# Altium footprint library ICs_VendorSpecific.PcbLib: 247 footprints (part 17 of 19)
Each footprint in its own frame and in the unit in brackets; x right, y up, seen from the top. Pads: shape width x height; smd on the part's side, far side on the other; paste and mask are expansions set on the pad; w line width, h text height; cw(c..) or ccw(c..) is an arc to the next point about the centre after c.
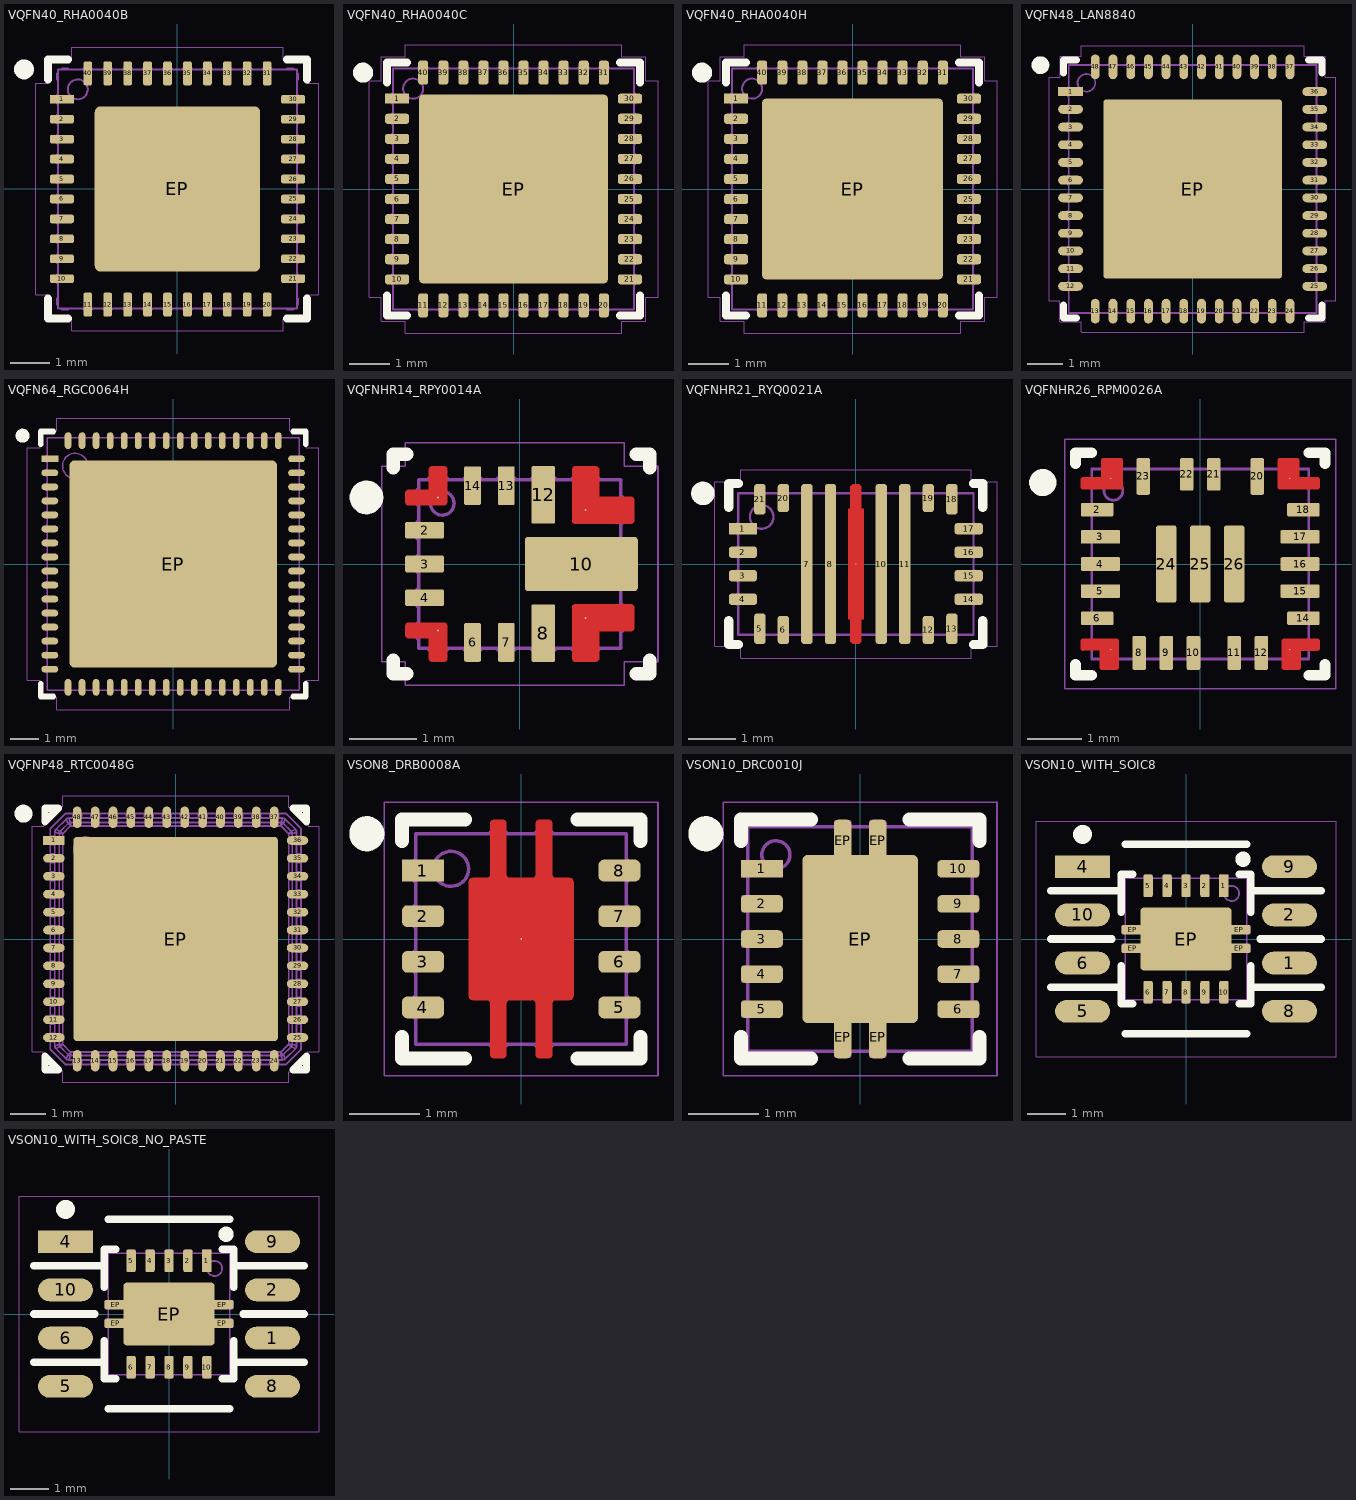
[diagram p16: the footprints below, top view; thin cyan lines are the x and y axes]

## VQFN40_RHA0040B [mm] "QFN, 40-Leads, Body 6x6mm, Pitch 0.50mm, Thermal Pad 4.150x4.15mm.  TI case RHA0040B"
height 1
pads (41):
  rect 0.6x0.22 smd paste+0 mask+0.05: 1(-2.9,2.25)
  rrect45% 0.6x0.22 smd paste+0 mask+0.05: 2(-2.9,1.75) 3(-2.9,1.25) 4(-2.9,0.75) 5(-2.9,0.25) 6(-2.9,-0.25) 7(-2.9,-0.75) 8(-2.9,-1.25) 9(-2.9,-1.75) 10(-2.9,-2.25) 21(2.9,-2.25) 22(2.9,-1.75) 23(2.9,-1.25) 24(2.9,-0.75) 25(2.9,-0.25) 26(2.9,0.25) 27(2.9,0.75) 28(2.9,1.25) 29(2.9,1.75) 30(2.9,2.25)
  rrect45% 0.22x0.6 smd paste+0 mask+0.05: 11(-2.25,-2.9) 12(-1.75,-2.9) 13(-1.25,-2.9) 14(-0.75,-2.9) 15(-0.25,-2.9) 16(0.25,-2.9) 17(0.75,-2.9) 18(1.25,-2.9) 19(1.75,-2.9) 20(2.25,-2.9) 31(2.25,2.9) 32(1.75,2.9) 33(1.25,2.9) 34(0.75,2.9) 35(0.25,2.9) 36(-0.25,2.9) 37(-0.75,2.9) 38(-1.25,2.9) 39(-1.75,2.9) 40(-2.25,2.9)
  rrect7% 4.15x4.15 smd paste-10 mask+0.05: EP(0,0)
Top Overlay:
  circle w0.25: c-3.85,3 r0.125
  lines w0.2: -3.25,-2.75 -3.25,-3.25 -2.75,-3.25 ; -3.25,2.75 -3.25,3.25 -2.75,3.25 ; 2.75,-3.25 3.25,-3.25 3.25,-2.75 ; 2.75,3.25 3.25,3.25 3.25,2.75
Top Paste:
  drawing of 9 lines, arcs and shapes, not listed
Top Courtyard:
  lines w0.025: -3.55,-2.65 -3.25,-2.65 -3.25,-3.25 -2.65,-3.25 -2.65,-3.55 2.65,-3.55 2.65,-3.25 3.25,-3.25 3.25,-2.65 3.55,-2.65 3.55,2.65 3.25,2.65 3.25,3.25 2.65,3.25 2.65,3.55 -2.65,3.55 -2.65,3.25 -3.25,3.25 -3.25,2.65 -3.55,2.65 -3.55,-2.65
Top Assembly:
  circle w0.05: c-2.5,2.5 r0.25
  lines w0.05: -3,-2.9 -3.025,-2.9 -3.025,-2.75 -3,-2.75 ; -3,-2.36 -3.025,-2.36 -3.025,-2.14 -3,-2.14 ; -3,-1.86 -3.025,-1.86 -3.025,-1.64 -3,-1.64 ; -3,-1.36 -3.025,-1.36 -3.025,-1.14 -3,-1.14 ; -3,-0.86 -3.025,-0.86 -3.025,-0.64 -3,-0.64 ; -3,-0.36 -3.025,-0.36 -3.025,-0.14 -3,-0.14 ; -3,0.14 -3.025,0.14 -3.025,0.36 -3,0.36 ; -3,0.64 -3.025,0.64 -3.025,0.86 -3,0.86 ; -3,1.14 -3.025,1.14 -3.025,1.36 -3,1.36 ; -3,1.64 -3.025,1.64 -3.025,1.86 -3,1.86 ; -3,2.14 -3.025,2.14 -3.025,2.36 -3,2.36 ; -3,2.75 -3.025,2.75 -3.025,2.9 -3,2.9 ; -2.9,-3 -2.9,-3.025 -2.75,-3.025 -2.75,-3 ; -2.9,3 -2.9,3.025 -2.75,3.025 -2.75,3 ; -2.36,-3 -2.36,-3.025 -2.14,-3.025 -2.14,-3 ; -2.36,3 -2.36,3.025 -2.14,3.025 -2.14,3 ; -1.86,-3 -1.86,-3.025 -1.64,-3.025 -1.64,-3 ; -1.86,3 -1.86,3.025 -1.64,3.025 -1.64,3 ; -1.36,-3 -1.36,-3.025 -1.14,-3.025 -1.14,-3 ; -1.36,3 -1.36,3.025 -1.14,3.025 -1.14,3 ; -0.86,-3 -0.86,-3.025 -0.64,-3.025 -0.64,-3 ; -0.86,3 -0.86,3.025 -0.64,3.025 -0.64,3 ; -0.36,-3 -0.36,-3.025 -0.14,-3.025 -0.14,-3 ; -0.36,3 -0.36,3.025 -0.14,3.025 -0.14,3 ; 0.14,-3 0.14,-3.025 0.36,-3.025 0.36,-3 ; 0.14,3 0.14,3.025 0.36,3.025 0.36,3 ; 0.64,-3 0.64,-3.025 0.86,-3.025 0.86,-3 ; 0.64,3 0.64,3.025 0.86,3.025 0.86,3 ; 1.14,-3 1.14,-3.025 1.36,-3.025 1.36,-3 ; 1.14,3 1.14,3.025 1.36,3.025 1.36,3 ; 1.64,-3 1.64,-3.025 1.86,-3.025 1.86,-3 ; 1.64,3 1.64,3.025 1.86,3.025 1.86,3 ; 2.14,-3 2.14,-3.025 2.36,-3.025 2.36,-3 ; 2.14,3 2.14,3.025 2.36,3.025 2.36,3 ; 2.75,-3 2.75,-3.025 2.9,-3.025 2.9,-3 ; 2.75,3 2.75,3.025 2.9,3.025 2.9,3 ; 3,-2.9 3.025,-2.9 3.025,-2.75 3,-2.75 ; 3,-2.36 3.025,-2.36 3.025,-2.14 3,-2.14 ; 3,-1.86 3.025,-1.86 3.025,-1.64 3,-1.64 ; 3,-1.36 3.025,-1.36 3.025,-1.14 3,-1.14 ; 3,-0.86 3.025,-0.86 3.025,-0.64 3,-0.64 ; 3,-0.36 3.025,-0.36 3.025,-0.14 3,-0.14 ; 3,0.14 3.025,0.14 3.025,0.36 3,0.36 ; 3,0.64 3.025,0.64 3.025,0.86 3,0.86 ; 3,1.14 3.025,1.14 3.025,1.36 3,1.36 ; 3,1.64 3.025,1.64 3.025,1.86 3,1.86 ; 3,2.14 3.025,2.14 3.025,2.36 3,2.36 ; 3,2.75 3.025,2.75 3.025,2.9 3,2.9 ; -3,-3 3,-3 3,3 -3,3 -3,-3
  text ".Designator" at -4.511,-0.453 h2
3D body "VQFN40_RHA0040B.x_t": height 1.02, standoff -0.01, extent -3.025,-3.025 3.025,3.025

## VQFN40_RHA0040C [mm] "VQFN 6mm x 6mm, TI case RHA0040C"
height 1
pads (41):
  rect 0.6x0.25 smd paste+0 mask+0.05: 1(-2.9,2.25)
  rrect50% 0.6x0.25 smd paste+0 mask+0.05: 2(-2.9,1.75) 3(-2.9,1.25) 4(-2.9,0.75) 5(-2.9,0.25) 6(-2.9,-0.25) 7(-2.9,-0.75) 8(-2.9,-1.25) 9(-2.9,-1.75) 10(-2.9,-2.25) 21(2.9,-2.25) 22(2.9,-1.75) 23(2.9,-1.25) 24(2.9,-0.75) 25(2.9,-0.25) 26(2.9,0.25) 27(2.9,0.75) 28(2.9,1.25) 29(2.9,1.75) 30(2.9,2.25)
  rrect50% 0.25x0.6 smd paste+0 mask+0.05: 11(-2.25,-2.9) 12(-1.75,-2.9) 13(-1.25,-2.9) 14(-0.75,-2.9) 15(-0.25,-2.9) 16(0.25,-2.9) 17(0.75,-2.9) 18(1.25,-2.9) 19(1.75,-2.9) 20(2.25,-2.9) 31(2.25,2.9) 32(1.75,2.9) 33(1.25,2.9) 34(0.75,2.9) 35(0.25,2.9) 36(-0.25,2.9) 37(-0.75,2.9) 38(-1.25,2.9) 39(-1.75,2.9) 40(-2.25,2.9)
  rrect4% 4.7x4.7 smd paste-10 mask+0.05: EP(0,0)
Top Overlay:
  circle w0.25: c-3.75,2.9 r0.125
  lines w0.2: -3.15,-2.65 -3.15,-3.15 -2.65,-3.15 ; -3.15,2.65 -3.15,3.15 -2.65,3.15 ; 2.65,-3.15 3.15,-3.15 3.15,-2.65 ; 2.65,3.15 3.15,3.15 3.15,2.65
Top Paste:
  rectangle: 0.9,-0.6 2.1,0.6
  rectangle: -0.6,-0.6 0.6,0.6
  rectangle: -2.1,-0.6 -0.9,0.6
  rectangle: -2.1,0.9 -0.9,2.1
  rectangle: -0.6,0.9 0.6,2.1
  rectangle: 0.9,0.9 2.1,2.1
  rectangle: 0.9,-2.1 2.1,-0.9
  rectangle: -0.6,-2.1 0.6,-0.9
  rectangle: -2.1,-2.1 -0.9,-0.9
Top Courtyard:
  lines w0.025: -3.6,-2.7 -3.6,2.7 -3.3,2.7 -3.3,3.3 -2.7,3.3 -2.7,3.6 2.7,3.6 2.7,3.3 3.3,3.3 3.3,2.7 3.6,2.7 3.6,-2.7 3.3,-2.7 3.3,-3.3 2.7,-3.3 2.7,-3.6 -2.7,-3.6 -2.7,-3.3 -3.3,-3.3 -3.3,-2.7 -3.6,-2.7
Top Assembly:
  circle w0.05: c-2.5,2.5 r0.25
  lines w0.05: -3,-2.375 -3.025,-2.375 -3.025,-2.125 -3,-2.125 ; -3,-1.875 -3.025,-1.875 -3.025,-1.625 -3,-1.625 ; -3,-1.375 -3.025,-1.375 -3.025,-1.125 -3,-1.125 ; -3,-0.875 -3.025,-0.875 -3.025,-0.625 -3,-0.625 ; -3,-0.375 -3.025,-0.375 -3.025,-0.125 -3,-0.125 ; -3,0.125 -3.025,0.125 -3.025,0.375 -3,0.375 ; -3,0.625 -3.025,0.625 -3.025,0.875 -3,0.875 ; -3,1.125 -3.025,1.125 -3.025,1.375 -3,1.375 ; -3,1.625 -3.025,1.625 -3.025,1.875 -3,1.875 ; -3,2.125 -3.025,2.125 -3.025,2.375 -3,2.375 ; -2.375,-3 -2.375,-3.025 -2.125,-3.025 -2.125,-3 ; -2.375,3 -2.375,3.025 -2.125,3.025 -2.125,3 ; -1.875,-3 -1.875,-3.025 -1.625,-3.025 -1.625,-3 ; -1.875,3 -1.875,3.025 -1.625,3.025 -1.625,3 ; -1.375,-3 -1.375,-3.025 -1.125,-3.025 -1.125,-3 ; -1.375,3 -1.375,3.025 -1.125,3.025 -1.125,3 ; -0.875,-3 -0.875,-3.025 -0.625,-3.025 -0.625,-3 ; -0.875,3 -0.875,3.025 -0.625,3.025 -0.625,3 ; -0.375,-3 -0.375,-3.025 -0.125,-3.025 -0.125,-3 ; -0.375,3 -0.375,3.025 -0.125,3.025 -0.125,3 ; 0.125,-3 0.125,-3.025 0.375,-3.025 0.375,-3 ; 0.125,3 0.125,3.025 0.375,3.025 0.375,3 ; 0.625,-3 0.625,-3.025 0.875,-3.025 0.875,-3 ; 0.625,3 0.625,3.025 0.875,3.025 0.875,3 ; 1.125,-3 1.125,-3.025 1.375,-3.025 1.375,-3 ; 1.125,3 1.125,3.025 1.375,3.025 1.375,3 ; 1.625,-3 1.625,-3.025 1.875,-3.025 1.875,-3 ; 1.625,3 1.625,3.025 1.875,3.025 1.875,3 ; 2.125,-3 2.125,-3.025 2.375,-3.025 2.375,-3 ; 2.125,3 2.125,3.025 2.375,3.025 2.375,3 ; 3,-2.375 3.025,-2.375 3.025,-2.125 3,-2.125 ; 3,-1.875 3.025,-1.875 3.025,-1.625 3,-1.625 ; 3,-1.375 3.025,-1.375 3.025,-1.125 3,-1.125 ; 3,-0.875 3.025,-0.875 3.025,-0.625 3,-0.625 ; 3,-0.375 3.025,-0.375 3.025,-0.125 3,-0.125 ; 3,0.125 3.025,0.125 3.025,0.375 3,0.375 ; 3,0.625 3.025,0.625 3.025,0.875 3,0.875 ; 3,1.125 3.025,1.125 3.025,1.375 3,1.375 ; 3,1.625 3.025,1.625 3.025,1.875 3,1.875 ; 3,2.125 3.025,2.125 3.025,2.375 3,2.375 ; -3,-3 3,-3 3,3 -3,3 -3,-3
  text ".Designator" at -4.511,-0.453 h2
3D body "VQFN40_RHA0040C.x_t": height 1.03, standoff 0, extent -3.025,-3.025 3.025,3.025

## VQFN40_RHA0040H [mm] "VQFN 6mm x 6mm, TI case RHA0040H"
height 1
pads (41):
  rect 0.6x0.25 smd paste+0 mask+0.05: 1(-2.9,2.25)
  rrect50% 0.6x0.25 smd paste+0 mask+0.05: 2(-2.9,1.75) 3(-2.9,1.25) 4(-2.9,0.75) 5(-2.9,0.25) 6(-2.9,-0.25) 7(-2.9,-0.75) 8(-2.9,-1.25) 9(-2.9,-1.75) 10(-2.9,-2.25) 21(2.9,-2.25) 22(2.9,-1.75) 23(2.9,-1.25) 24(2.9,-0.75) 25(2.9,-0.25) 26(2.9,0.25) 27(2.9,0.75) 28(2.9,1.25) 29(2.9,1.75) 30(2.9,2.25)
  rrect50% 0.25x0.6 smd paste+0 mask+0.05: 11(-2.25,-2.9) 12(-1.75,-2.9) 13(-1.25,-2.9) 14(-0.75,-2.9) 15(-0.25,-2.9) 16(0.25,-2.9) 17(0.75,-2.9) 18(1.25,-2.9) 19(1.75,-2.9) 20(2.25,-2.9) 31(2.25,2.9) 32(1.75,2.9) 33(1.25,2.9) 34(0.75,2.9) 35(0.25,2.9) 36(-0.25,2.9) 37(-0.75,2.9) 38(-1.25,2.9) 39(-1.75,2.9) 40(-2.25,2.9)
  rrect4% 4.5x4.5 smd paste-10 mask+0.05: EP(0,0)
Top Overlay:
  circle w0.25: c-3.75,2.9 r0.125
  lines w0.2: -3.15,-2.65 -3.15,-3.15 -2.65,-3.15 ; -3.15,2.65 -3.15,3.15 -2.65,3.15 ; 2.65,-3.15 3.15,-3.15 3.15,-2.65 ; 2.65,3.15 3.15,3.15 3.15,2.65
Top Paste:
  rectangle: -2.1,-2.1 -0.9,-0.9
  rectangle: -0.6,-2.1 0.6,-0.9
  rectangle: 0.9,-2.1 2.1,-0.9
  rectangle: 0.9,0.9 2.1,2.1
  rectangle: -0.6,0.9 0.6,2.1
  rectangle: -2.1,0.9 -0.9,2.1
  rectangle: -2.1,-0.6 -0.9,0.6
  rectangle: -0.6,-0.6 0.6,0.6
  rectangle: 0.9,-0.6 2.1,0.6
Top Courtyard:
  lines w0.025: -3.6,-2.7 -3.6,2.7 -3.3,2.7 -3.3,3.3 -2.7,3.3 -2.7,3.6 2.7,3.6 2.7,3.3 3.3,3.3 3.3,2.7 3.6,2.7 3.6,-2.7 3.3,-2.7 3.3,-3.3 2.7,-3.3 2.7,-3.6 -2.7,-3.6 -2.7,-3.3 -3.3,-3.3 -3.3,-2.7 -3.6,-2.7
Top Assembly:
  circle w0.05: c-2.5,2.5 r0.25
  lines w0.05: -3,-2.375 -3.025,-2.375 -3.025,-2.125 -3,-2.125 ; -3,-1.875 -3.025,-1.875 -3.025,-1.625 -3,-1.625 ; -3,-1.375 -3.025,-1.375 -3.025,-1.125 -3,-1.125 ; -3,-0.875 -3.025,-0.875 -3.025,-0.625 -3,-0.625 ; -3,-0.375 -3.025,-0.375 -3.025,-0.125 -3,-0.125 ; -3,0.125 -3.025,0.125 -3.025,0.375 -3,0.375 ; -3,0.625 -3.025,0.625 -3.025,0.875 -3,0.875 ; -3,1.125 -3.025,1.125 -3.025,1.375 -3,1.375 ; -3,1.625 -3.025,1.625 -3.025,1.875 -3,1.875 ; -3,2.125 -3.025,2.125 -3.025,2.375 -3,2.375 ; -2.375,-3 -2.375,-3.025 -2.125,-3.025 -2.125,-3 ; -2.375,3 -2.375,3.025 -2.125,3.025 -2.125,3 ; -1.875,-3 -1.875,-3.025 -1.625,-3.025 -1.625,-3 ; -1.875,3 -1.875,3.025 -1.625,3.025 -1.625,3 ; -1.375,-3 -1.375,-3.025 -1.125,-3.025 -1.125,-3 ; -1.375,3 -1.375,3.025 -1.125,3.025 -1.125,3 ; -0.875,-3 -0.875,-3.025 -0.625,-3.025 -0.625,-3 ; -0.875,3 -0.875,3.025 -0.625,3.025 -0.625,3 ; -0.375,-3 -0.375,-3.025 -0.125,-3.025 -0.125,-3 ; -0.375,3 -0.375,3.025 -0.125,3.025 -0.125,3 ; 0.125,-3 0.125,-3.025 0.375,-3.025 0.375,-3 ; 0.125,3 0.125,3.025 0.375,3.025 0.375,3 ; 0.625,-3 0.625,-3.025 0.875,-3.025 0.875,-3 ; 0.625,3 0.625,3.025 0.875,3.025 0.875,3 ; 1.125,-3 1.125,-3.025 1.375,-3.025 1.375,-3 ; 1.125,3 1.125,3.025 1.375,3.025 1.375,3 ; 1.625,-3 1.625,-3.025 1.875,-3.025 1.875,-3 ; 1.625,3 1.625,3.025 1.875,3.025 1.875,3 ; 2.125,-3 2.125,-3.025 2.375,-3.025 2.375,-3 ; 2.125,3 2.125,3.025 2.375,3.025 2.375,3 ; 3,-2.375 3.025,-2.375 3.025,-2.125 3,-2.125 ; 3,-1.875 3.025,-1.875 3.025,-1.625 3,-1.625 ; 3,-1.375 3.025,-1.375 3.025,-1.125 3,-1.125 ; 3,-0.875 3.025,-0.875 3.025,-0.625 3,-0.625 ; 3,-0.375 3.025,-0.375 3.025,-0.125 3,-0.125 ; 3,0.125 3.025,0.125 3.025,0.375 3,0.375 ; 3,0.625 3.025,0.625 3.025,0.875 3,0.875 ; 3,1.125 3.025,1.125 3.025,1.375 3,1.375 ; 3,1.625 3.025,1.625 3.025,1.875 3,1.875 ; 3,2.125 3.025,2.125 3.025,2.375 3,2.375 ; -3,-3 3,-3 3,3 -3,3 -3,-3
  text ".Designator" at -4.511,-0.453 h2
3D body "VQFN40_RHA0040H.x_t": height 1.03, standoff 0, extent -3.025,-3.025 3.025,3.025

## VQFN48_LAN8840 [mm] "VQFN, 48-Leads, Body 7x7mm, Pitch 0.50mm, Thermal Pad 5.05x5.05mm."
height 0.9
pads (49):
  rect 0.7x0.25 smd paste+0 mask+0.05: 1(-3.45,2.75)
  oval 0.7x0.25 smd paste+0 mask+0.05: 2(-3.45,2.25) 3(-3.45,1.75) 4(-3.45,1.25) 5(-3.45,0.75) 6(-3.45,0.25) 7(-3.45,-0.25) 8(-3.45,-0.75) 9(-3.45,-1.25) 10(-3.45,-1.75) 11(-3.45,-2.25) 12(-3.45,-2.75) 25(3.45,-2.75) 26(3.45,-2.25) 27(3.45,-1.75) 28(3.45,-1.25) 29(3.45,-0.75) 30(3.45,-0.25) 31(3.45,0.25) 32(3.45,0.75) 33(3.45,1.25) 34(3.45,1.75) 35(3.45,2.25) 36(3.45,2.75)
  oval 0.25x0.7 smd paste+0 mask+0.05: 13(-2.75,-3.45) 14(-2.25,-3.45) 15(-1.75,-3.45) 16(-1.25,-3.45) 17(-0.75,-3.45) 18(-0.25,-3.45) 19(0.25,-3.45) 20(0.75,-3.45) 21(1.25,-3.45) 22(1.75,-3.45) 23(2.25,-3.45) 24(2.75,-3.45) 37(2.75,3.45) 38(2.25,3.45) 39(1.75,3.45) 40(1.25,3.45) 41(0.75,3.45) 42(0.25,3.45) 43(-0.25,3.45) 44(-0.75,3.45) 45(-1.25,3.45) 46(-1.75,3.45) 47(-2.25,3.45) 48(-2.75,3.45)
  rrect3% 5.05x5.05 smd paste-50 mask+0.05: EP(0,0)
Top Overlay:
  circle w0.25: c-4.3,3.5 r0.125
  lines w0.2: -3.65,-3.275 -3.65,-3.65 -3.275,-3.65 ; -3.65,3.275 -3.65,3.65 -3.275,3.65 ; 3.275,-3.65 3.65,-3.65 3.65,-3.275 ; 3.275,3.65 3.65,3.65 3.65,3.275
Top Paste:
  region: 1.15,-1.15 1.15,-0.15 0.15,-0.15 0.15,-1.15
  region: -1.45,-1.15 -1.45,-0.15 -2.45,-0.15 -2.45,-1.15
  region: -0.15,-1.15 -0.15,-0.15 -1.15,-0.15 -1.15,-1.15
  region: -1.45,1.45 -1.45,2.45 -2.45,2.45 -2.45,1.45
  region: -0.15,1.45 -0.15,2.45 -1.15,2.45 -1.15,1.45
  region: 1.15,1.45 1.15,2.45 0.15,2.45 0.15,1.45
  region: 1.15,0.15 1.15,1.15 0.15,1.15 0.15,0.15
  region: -1.45,0.15 -1.45,1.15 -2.45,1.15 -2.45,0.15
  region: -0.15,0.15 -0.15,1.15 -1.15,1.15 -1.15,0.15
  region: 1.15,-2.45 1.15,-1.45 0.15,-1.45 0.15,-2.45
  region: -1.45,-2.45 -1.45,-1.45 -2.45,-1.45 -2.45,-2.45
  region: -0.15,-2.45 -0.15,-1.45 -1.15,-1.45 -1.15,-2.45
  region: 2.45,-1.15 2.45,-0.15 1.45,-0.15 1.45,-1.15
  region: 2.45,1.45 2.45,2.45 1.45,2.45 1.45,1.45
  region: 2.45,0.15 2.45,1.15 1.45,1.15 1.45,0.15
  region: 2.45,-2.45 2.45,-1.45 1.45,-1.45 1.45,-2.45
Top Courtyard:
  lines w0.025: -4.05,-3.15 -3.75,-3.15 -3.75,-3.75 -3.15,-3.75 -3.15,-4.05 3.15,-4.05 3.15,-3.75 3.75,-3.75 3.75,-3.15 4.05,-3.15 4.05,3.15 3.75,3.15 3.75,3.75 3.15,3.75 3.15,4.05 -3.15,4.05 -3.15,3.75 -3.75,3.75 -3.75,3.15 -4.05,3.15 -4.05,-3.15
Top Assembly:
  circle w0.05: c-3,3 r0.25
  lines w0.05: -3.5,-2.875 -3.525,-2.875 -3.525,-2.625 -3.5,-2.625 ; -3.5,-2.375 -3.525,-2.375 -3.525,-2.125 -3.5,-2.125 ; -3.5,-1.875 -3.525,-1.875 -3.525,-1.625 -3.5,-1.625 ; -3.5,-1.375 -3.525,-1.375 -3.525,-1.125 -3.5,-1.125 ; -3.5,-0.875 -3.525,-0.875 -3.525,-0.625 -3.5,-0.625 ; -3.5,-0.375 -3.525,-0.375 -3.525,-0.125 -3.5,-0.125 ; -3.5,0.125 -3.525,0.125 -3.525,0.375 -3.5,0.375 ; -3.5,0.625 -3.525,0.625 -3.525,0.875 -3.5,0.875 ; -3.5,1.125 -3.525,1.125 -3.525,1.375 -3.5,1.375 ; -3.5,1.625 -3.525,1.625 -3.525,1.875 -3.5,1.875 ; -3.5,2.125 -3.525,2.125 -3.525,2.375 -3.5,2.375 ; -3.5,2.625 -3.525,2.625 -3.525,2.875 -3.5,2.875 ; -2.875,-3.5 -2.875,-3.525 -2.625,-3.525 -2.625,-3.5 ; -2.875,3.5 -2.875,3.525 -2.625,3.525 -2.625,3.5 ; -2.375,-3.5 -2.375,-3.525 -2.125,-3.525 -2.125,-3.5 ; -2.375,3.5 -2.375,3.525 -2.125,3.525 -2.125,3.5 ; -1.875,-3.5 -1.875,-3.525 -1.625,-3.525 -1.625,-3.5 ; -1.875,3.5 -1.875,3.525 -1.625,3.525 -1.625,3.5 ; -1.375,-3.5 -1.375,-3.525 -1.125,-3.525 -1.125,-3.5 ; -1.375,3.5 -1.375,3.525 -1.125,3.525 -1.125,3.5 ; -0.875,-3.5 -0.875,-3.525 -0.625,-3.525 -0.625,-3.5 ; -0.875,3.5 -0.875,3.525 -0.625,3.525 -0.625,3.5 ; -0.375,-3.5 -0.375,-3.525 -0.125,-3.525 -0.125,-3.5 ; -0.375,3.5 -0.375,3.525 -0.125,3.525 -0.125,3.5 ; 0.125,-3.5 0.125,-3.525 0.375,-3.525 0.375,-3.5 ; 0.125,3.5 0.125,3.525 0.375,3.525 0.375,3.5 ; 0.625,-3.5 0.625,-3.525 0.875,-3.525 0.875,-3.5 ; 0.625,3.5 0.625,3.525 0.875,3.525 0.875,3.5 ; 1.125,-3.5 1.125,-3.525 1.375,-3.525 1.375,-3.5 ; 1.125,3.5 1.125,3.525 1.375,3.525 1.375,3.5 ; 1.625,-3.5 1.625,-3.525 1.875,-3.525 1.875,-3.5 ; 1.625,3.5 1.625,3.525 1.875,3.525 1.875,3.5 ; 2.125,-3.5 2.125,-3.525 2.375,-3.525 2.375,-3.5 ; 2.125,3.5 2.125,3.525 2.375,3.525 2.375,3.5 ; 2.625,-3.5 2.625,-3.525 2.875,-3.525 2.875,-3.5 ; 2.625,3.5 2.625,3.525 2.875,3.525 2.875,3.5 ; 3.5,-2.875 3.525,-2.875 3.525,-2.625 3.5,-2.625 ; 3.5,-2.375 3.525,-2.375 3.525,-2.125 3.5,-2.125 ; 3.5,-1.875 3.525,-1.875 3.525,-1.625 3.5,-1.625 ; 3.5,-1.375 3.525,-1.375 3.525,-1.125 3.5,-1.125 ; 3.5,-0.875 3.525,-0.875 3.525,-0.625 3.5,-0.625 ; 3.5,-0.375 3.525,-0.375 3.525,-0.125 3.5,-0.125 ; 3.5,0.125 3.525,0.125 3.525,0.375 3.5,0.375 ; 3.5,0.625 3.525,0.625 3.525,0.875 3.5,0.875 ; 3.5,1.125 3.525,1.125 3.525,1.375 3.5,1.375 ; 3.5,1.625 3.525,1.625 3.525,1.875 3.5,1.875 ; 3.5,2.125 3.525,2.125 3.525,2.375 3.5,2.375 ; 3.5,2.625 3.525,2.625 3.525,2.875 3.5,2.875 ; -3.5,-3.5 -3.5,3.5 3.5,3.5 3.5,-3.5 -3.5,-3.5
  text ".Designator" at -4.511,-0.453 h2
3D body "VQFN48_LAN8840.x_t": height 0.93, standoff 0.01, extent -3.52,-3.52 3.52,3.52

## VQFN64_RGC0064H [mm] "QFN, 64-Leads, Body 9x9mm, Pitch 0.50mm, Thermal Pad 7.40x7.40mm. TI Case RGC0064H"
height 0.9
pads (65):
  rect 0.6x0.24 smd paste+0 mask+0.05: 1(-4.4,3.75)
  oval 0.6x0.24 smd paste+0 mask+0.05: 2(-4.4,3.25) 3(-4.4,2.75) 4(-4.4,2.25) 5(-4.4,1.75) 6(-4.4,1.25) 7(-4.4,0.75) 8(-4.4,0.25) 9(-4.4,-0.25) 10(-4.4,-0.75) 11(-4.4,-1.25) 12(-4.4,-1.75) 13(-4.4,-2.25) 14(-4.4,-2.75) 15(-4.4,-3.25) 16(-4.4,-3.75) 33(4.4,-3.75) 34(4.4,-3.25) 35(4.4,-2.75) 36(4.4,-2.25) 37(4.4,-1.75) 38(4.4,-1.25) 39(4.4,-0.75) 40(4.4,-0.25) 41(4.4,0.25) 42(4.4,0.75) 43(4.4,1.25) 44(4.4,1.75) 45(4.4,2.25) 46(4.4,2.75) 47(4.4,3.25) 48(4.4,3.75)
  oval 0.24x0.6 smd paste+0 mask+0.05: 17(-3.75,-4.4) 18(-3.25,-4.4) 19(-2.75,-4.4) 20(-2.25,-4.4) 21(-1.75,-4.4) 22(-1.25,-4.4) 23(-0.75,-4.4) 24(-0.25,-4.4) 25(0.25,-4.4) 26(0.75,-4.4) 27(1.25,-4.4) 28(1.75,-4.4) 29(2.25,-4.4) 30(2.75,-4.4) 31(3.25,-4.4) 32(3.75,-4.4) 49(3.75,4.4) 50(3.25,4.4) 51(2.75,4.4) 52(2.25,4.4) 53(1.75,4.4) 54(1.25,4.4) 55(0.75,4.4) 56(0.25,4.4) 57(-0.25,4.4) 58(-0.75,4.4) 59(-1.25,4.4) 60(-1.75,4.4) 61(-2.25,4.4) 62(-2.75,4.4) 63(-3.25,4.4) 64(-3.75,4.4)
  rrect5% 7.4x7.4 smd paste-50 mask+0.05: EP(0,0)
Top Overlay:
  circle w0.25: c-5.375,4.575 r0.125
  lines w0.2: -4.725,-4.275 -4.725,-4.725 -4.275,-4.725 ; -4.725,4.275 -4.725,4.725 -4.275,4.725 ; 4.275,-4.725 4.725,-4.725 4.725,-4.275 ; 4.275,4.725 4.725,4.725 4.725,4.275
Top Paste:
  region: -2.25,-2.25 -3.35,-2.25 -3.35,-3.35 -2.25,-3.35
  region: -0.85,-2.25 -1.95,-2.25 -1.95,-3.35 -0.85,-3.35
  rectangle: 2.25,-3.35 3.35,-2.25
  rectangle: 0.85,-3.35 1.95,-2.25
  rectangle: -0.55,-3.35 0.55,-2.25
  region: -2.25,-0.85 -3.35,-0.85 -3.35,-1.95 -2.25,-1.95
  region: -0.85,-0.85 -1.95,-0.85 -1.95,-1.95 -0.85,-1.95
  rectangle: 2.25,-1.95 3.35,-0.85
  rectangle: 0.85,-1.95 1.95,-0.85
  rectangle: -0.55,-1.95 0.55,-0.85
  rectangle: 2.25,2.25 3.35,3.35
  rectangle: 0.85,2.25 1.95,3.35
  region: -2.25,3.35 -3.35,3.35 -3.35,2.25 -2.25,2.25
  region: -0.85,3.35 -1.95,3.35 -1.95,2.25 -0.85,2.25
  region: 0.55,3.35 -0.55,3.35 -0.55,2.25 0.55,2.25
  rectangle: 2.25,0.85 3.35,1.95
  rectangle: 0.85,0.85 1.95,1.95
  region: -2.25,1.95 -3.35,1.95 -3.35,0.85 -2.25,0.85
  region: -0.85,1.95 -1.95,1.95 -1.95,0.85 -0.85,0.85
  region: 0.55,1.95 -0.55,1.95 -0.55,0.85 0.55,0.85
  rectangle: 2.25,-0.55 3.35,0.55
  rectangle: 0.85,-0.55 1.95,0.55
  region: -2.25,0.55 -3.35,0.55 -3.35,-0.55 -2.25,-0.55
  region: -0.85,0.55 -1.95,0.55 -1.95,-0.55 -0.85,-0.55
  region: 0.55,0.55 -0.55,0.55 -0.55,-0.55 0.55,-0.55
Top Courtyard:
  lines w0.025: -5.2,-4.15 -5.2,4.15 -4.75,4.15 -4.75,4.75 -4.15,4.75 -4.15,5.2 4.15,5.2 4.15,4.75 4.75,4.75 4.75,4.15 5.2,4.15 5.2,-4.15 4.75,-4.15 4.75,-4.75 4.15,-4.75 4.15,-5.2 -4.15,-5.2 -4.15,-4.75 -4.75,-4.75 -4.75,-4.15 -5.2,-4.15
Top Assembly:
  drawing of 197 lines, arcs and shapes, not listed
  text ".Designator" at -6.763,-0.679 h3
3D body "VQFN64_RGC0064H.x_t": height 0.92, standoff 0, extent -4.52,-4.52 4.52,4.52

## VQFNHR14_RPY0014A [mm] "Power VQFN 3mm x 2.5mm, TI case RPY0014A"
height 1
pads (14):
  round 0.025 smd mask+0.05: 1(-1.213,0.987) 5(-1.212,-0.988) 9(0.975,-0.8) 11(0.975,0.8)
  rrect20% 0.575x0.25 smd paste+0 mask+0.05: 2(-1.412,0.5) 3(-1.412,0) 4(-1.412,-0.5)
  rrect20% 0.25x0.575 smd paste+0 mask+0.05: 6(-0.7,-1.162) 7(-0.2,-1.162) 13(-0.2,1.162) 14(-0.7,1.162)
  rrect10% 0.35x0.851 smd paste+0 mask+0.05: 8(0.35,-1.025) 12(0.35,1.025)
  rrect10% 1.675x0.8 smd paste-0.825 mask-0.826: 10(0.913,0)
Top Layer:
  region: 1.237,0.6 1.65,0.6 1.66,0.6 1.678,0.608 1.692,0.622 1.7,0.64 1.7,0.65 1.7,0.95 1.7,0.96 1.692,0.978 1.678,0.992 1.66,1 1.65,1 1.175,1 1.175,1.4 1.175,1.41 1.167,1.428 1.153,1.442 1.135,1.45 1.125,1.45 0.82,1.45 0.811,1.45 0.795,1.443 0.782,1.43 0.775,1.414 0.775,1.405 0.775,0.64 0.775,0.632 0.781,0.617 0.792,0.606 0.807,0.6 0.815,0.6 0.874,0.6
  region: 1.237,-0.6 1.65,-0.6 1.66,-0.6 1.678,-0.608 1.692,-0.622 1.7,-0.64 1.7,-0.65 1.7,-0.95 1.7,-0.96 1.692,-0.978 1.678,-0.992 1.66,-1 1.65,-1 1.175,-1 1.175,-1.4 1.175,-1.41 1.167,-1.428 1.153,-1.442 1.135,-1.45 1.125,-1.45 0.82,-1.45 0.811,-1.45 0.795,-1.443 0.782,-1.43 0.775,-1.414 0.775,-1.405 0.775,-0.64 0.775,-0.632 0.781,-0.617 0.792,-0.606 0.807,-0.6 0.815,-0.6 0.874,-0.6
  region: -1.115,-0.875 -1.107,-0.875 -1.092,-0.881 -1.081,-0.892 -1.075,-0.907 -1.075,-0.915 -1.075,-1.4 -1.075,-1.405 -1.075,-1.414 -1.082,-1.431 -1.094,-1.443 -1.111,-1.45 -1.12,-1.45 -1.3,-1.45 -1.31,-1.45 -1.328,-1.443 -1.342,-1.428 -1.35,-1.41 -1.35,-1.4 -1.35,-1.1 -1.655,-1.1 -1.664,-1.1 -1.68,-1.093 -1.693,-1.081 -1.7,-1.064 -1.7,-1.055 -1.7,-0.915 -1.7,-0.907 -1.694,-0.892 -1.683,-0.881 -1.668,-0.875 -1.66,-0.875
  region: -1.115,0.875 -1.107,0.875 -1.092,0.881 -1.081,0.892 -1.075,0.907 -1.075,0.915 -1.075,1.4 -1.075,1.405 -1.075,1.414 -1.082,1.43 -1.095,1.443 -1.111,1.45 -1.12,1.45 -1.3,1.45 -1.31,1.45 -1.328,1.442 -1.342,1.428 -1.35,1.41 -1.35,1.4 -1.35,1.1 -1.655,1.1 -1.664,1.1 -1.68,1.093 -1.693,1.08 -1.7,1.064 -1.7,1.055 -1.7,0.915 -1.7,0.907 -1.694,0.892 -1.683,0.881 -1.668,0.875 -1.66,0.875
Top Overlay:
  circle w0.25: c-2.275,0.988 r0.125
  lines w0.2: -1.875,-1.425 -1.875,-1.625 -1.675,-1.625 ; -1.875,1.425 -1.875,1.625 -1.675,1.625 ; 1.725,-1.625 1.925,-1.625 1.925,-1.425 ; 1.725,1.625 1.925,1.625 1.925,1.425
Top Paste:
  drawing of 5 lines, arcs and shapes, not listed
Top Solder:
  region: 0.125,-0.3 0.125,-0.31 0.133,-0.328 0.147,-0.342 0.165,-0.35 0.175,-0.35 1.65,-0.35 1.66,-0.35 1.678,-0.342 1.692,-0.328 1.7,-0.31 1.7,-0.3 1.7,-0.175 1.7,-0.165 1.692,-0.147 1.678,-0.133 1.66,-0.125 1.65,-0.125 1.35,-0.125 1.35,0.125 1.65,0.125 1.66,0.125 1.678,0.133 1.692,0.147 1.7,0.165 1.7,0.175 1.7,0.3 1.7,0.31 1.692,0.328 1.678,0.342 1.66,0.35 1.65,0.35 0.175,0.35 0.165,0.35 0.147,0.342 0.133,0.328 0.125,0.31 0.125,0.3
Top Courtyard:
  lines w0.025: -2.05,-1.45 -2.05,1.45 -1.7,1.45 -1.7,1.8 1.55,1.8 1.55,1.45 2.05,1.45 2.05,-1.45 1.55,-1.45 1.55,-1.8 -1.7,-1.8 -1.7,-1.45 -2.05,-1.45
Top Assembly:
  circle w0.05: c-1.15,0.9 r0.175
  lines w0.05: -1.5,-1.1 -1.52,-1.1 -1.52,-0.875 -1.5,-0.875 ; -1.5,-0.625 -1.52,-0.625 -1.52,-0.375 -1.5,-0.375 ; -1.5,-0.125 -1.52,-0.125 -1.52,0.125 -1.5,0.125 ; -1.5,0.375 -1.52,0.375 -1.52,0.625 -1.5,0.625 ; -1.5,0.875 -1.52,0.875 -1.52,1.1 -1.5,1.1 ; -1.35,-1.25 -1.35,-1.27 -1.075,-1.27 -1.075,-1.25 ; -1.35,1.25 -1.35,1.27 -1.075,1.27 -1.075,1.25 ; -0.825,-1.25 -0.825,-1.27 -0.575,-1.27 -0.575,-1.25 ; -0.825,1.25 -0.825,1.27 -0.575,1.27 -0.575,1.25 ; -0.325,-1.25 -0.325,-1.27 -0.075,-1.27 -0.075,-1.25 ; -0.325,1.25 -0.325,1.27 -0.075,1.27 -0.075,1.25 ; 0.175,-1.25 0.175,-1.27 0.525,-1.27 0.525,-1.25 ; 0.175,1.25 0.175,1.27 0.525,1.27 0.525,1.25 ; 0.775,-1.25 0.775,-1.27 1.175,-1.27 1.175,-1.25 ; 0.775,1.25 0.775,1.27 1.175,1.27 1.175,1.25 ; 1.5,-1 1.52,-1 1.52,-0.6 1.5,-0.6 ; 1.5,-0.35 1.52,-0.35 1.52,-0.125 1.5,-0.125 ; 1.5,0.125 1.52,0.125 1.52,0.35 1.5,0.35 ; 1.5,0.6 1.52,0.6 1.52,1 1.5,1 ; -1.5,-1.25 1.5,-1.25 1.5,1.25 -1.5,1.25 -1.5,-1.25
  text ".Designator" at -3.378,-0.339 h1.5
3D body "VQFN-HR-14(RPY0014A).x_t": height 0.92, standoff 0, extent -1.52,-1.27 1.52,1.27

## VQFNHR21_RYQ0021A [mm] "Power VQFN 3mm x 5mm, TI case RYQ0021A"
height 1
pads (21):
  rect 0.6x0.24 smd paste+0 mask+0.05: 1(-2.4,0.75)
  rrect50% 0.6x0.24 smd paste+0 mask+0.05: 2(-2.4,0.25) 3(-2.4,-0.25) 4(-2.4,-0.75) 14(2.4,-0.75) 15(2.4,-0.25) 16(2.4,0.25) 17(2.4,0.75)
  rrect50% 0.24x0.65 smd paste+0 mask+0.05: 5(-2.04,-1.375) 13(2.04,-1.375) 18(2.04,1.375) 21(-2.04,1.375)
  rrect50% 0.24x0.6 smd paste+0 mask+0.05: 6(-1.54,-1.4) 12(1.54,-1.4) 19(1.54,1.4) 20(-1.54,1.4)
  rrect50% 0.24x3.4 smd mask+0.05: 7(-1.04,0) 8(-0.54,0) 10(0.54,0) 11(1.04,0)
  round 0.025 smd mask+0.05: 9(0,0)
Top Layer:
  region: -0.12,-1.175 -0.165,-1.175 -0.165,1.175 -0.12,1.175 -0.12,1.65 -0.07,1.7 0.07,1.7 0.12,1.65 0.12,1.175 0.165,1.175 0.165,-1.175 0.12,-1.175 0.12,-1.65 0.07,-1.7 -0.07,-1.7 -0.12,-1.65
Top Overlay:
  circle w0.25: c-3.25,1.5 r0.125
  lines w0.2: -2.7,-1.21 -2.7,-1.71 -2.5,-1.71 ; -2.7,1.21 -2.7,1.71 -2.5,1.71 ; 2.5,-1.71 2.7,-1.71 2.7,-1.21 ; 2.5,1.71 2.7,1.71 2.7,1.21
Top Courtyard:
  lines w0.025: -3,-1.75 -2.45,-1.75 -2.45,-2 2.45,-2 2.45,-1.75 3,-1.75 3,1.75 2.45,1.75 2.45,2 -2.45,2 -2.45,1.75 -3,1.75 -3,-1.75
Top Assembly:
  circle w0.05: c-2,1 r0.25
  lines w0.05: -2.5,-0.875 -2.51,-0.875 -2.51,-0.625 -2.5,-0.625 ; -2.5,-0.375 -2.51,-0.375 -2.51,-0.125 -2.5,-0.125 ; -2.5,0.125 -2.51,0.125 -2.51,0.375 -2.5,0.375 ; -2.5,0.625 -2.51,0.625 -2.51,0.875 -2.5,0.875 ; -2.165,-1.5 -2.165,-1.51 -1.915,-1.51 -1.915,-1.5 ; -2.165,1.5 -2.165,1.51 -1.915,1.51 -1.915,1.5 ; -1.665,-1.5 -1.665,-1.51 -1.415,-1.51 -1.415,-1.5 ; -1.665,1.5 -1.665,1.51 -1.415,1.51 -1.415,1.5 ; -1.165,-1.5 -1.165,-1.51 -0.915,-1.51 -0.915,-1.5 ; -1.165,1.5 -1.165,1.51 -0.915,1.51 -0.915,1.5 ; -0.665,-1.5 -0.665,-1.51 -0.415,-1.51 -0.415,-1.5 ; -0.665,1.5 -0.665,1.51 -0.415,1.51 -0.415,1.5 ; -0.125,-1.5 -0.125,-1.51 0.125,-1.51 0.125,-1.5 ; -0.125,1.5 -0.125,1.51 0.125,1.51 0.125,1.5 ; 0.415,-1.5 0.415,-1.51 0.665,-1.51 0.665,-1.5 ; 0.415,1.5 0.415,1.51 0.665,1.51 0.665,1.5 ; 0.915,-1.5 0.915,-1.51 1.165,-1.51 1.165,-1.5 ; 0.915,1.5 0.915,1.51 1.165,1.51 1.165,1.5 ; 1.415,-1.5 1.415,-1.51 1.665,-1.51 1.665,-1.5 ; 1.415,1.5 1.415,1.51 1.665,1.51 1.665,1.5 ; 1.915,-1.5 1.915,-1.51 2.165,-1.51 2.165,-1.5 ; 1.915,1.5 1.915,1.51 2.165,1.51 2.165,1.5 ; 2.5,-0.875 2.51,-0.875 2.51,-0.625 2.5,-0.625 ; 2.5,-0.375 2.51,-0.375 2.51,-0.125 2.5,-0.125 ; 2.5,0.125 2.51,0.125 2.51,0.375 2.5,0.375 ; 2.5,0.625 2.51,0.625 2.51,0.875 2.5,0.875 ; -2.5,-1.5 2.5,-1.5 2.5,1.5 -2.5,1.5 -2.5,-1.5
  text ".Designator" at -3.378,-0.339 h1.5
3D body "VQFNHR21_RYQ0021A.x_t": height 1.02, standoff 0, extent -2.51,-1.51 2.51,1.51

## VQFNHR26_RPM0026A [mm] "Power VQFN 3.5mm x 4mm, TI case RPM0026A"
height 1
pads (26):
  round 0.025 smd mask+0: 1(-1.65,1.575) 7(-1.65,-1.575) 13(1.65,-1.575) 19(1.65,1.575)
  rrect20% 0.6x0.25 smd mask+0.05: 2(-1.9,1) 6(-1.9,-1)
  rrect20% 0.725x0.25 smd mask+0.05: 3(-1.837,0.5) 4(-1.837,0) 5(-1.837,-0.5)
  rrect25% 0.25x0.625 smd mask+0.05: 8(-1.125,-1.637) 9(-0.625,-1.637) 10(-0.125,-1.637) 11(0.625,-1.637) 12(1.125,-1.637)
  rrect25% 0.6x0.25 smd mask+0.05: 14(1.9,-1) 18(1.9,1)
  rrect25% 0.725x0.25 smd mask+0.05: 15(1.837,-0.5) 16(1.837,0) 17(1.837,0.5)
  rrect25% 0.25x0.675 smd mask+0.05: 20(1.05,1.613) 23(-1.05,1.613)
  rrect25% 0.25x0.6 smd mask+0.05: 21(0.25,1.65) 22(-0.25,1.65)
  rrect25% 0.375x1.425 smd mask+0.05: 24(-0.625,0) 25(0,0) 26(0.625,0)
Top Layer:
  region: -1.467,1.949 -1.465,1.949 -1.462,1.948 -1.46,1.948 -1.457,1.947 -1.455,1.946 -1.452,1.945 -1.45,1.943 -1.448,1.942 -1.446,1.94 -1.444,1.939 -1.442,1.937 -1.44,1.935 -1.438,1.933 -1.436,1.931 -1.435,1.929 -1.433,1.927 -1.432,1.925 -1.43,1.923 -1.429,1.92 -1.428,1.918 -1.427,1.915 -1.427,1.913 -1.426,1.91 -1.426,1.908 -1.425,1.905 -1.425,1.903 -1.425,1.9 -1.425,1.425 -1.425,1.422 -1.425,1.42 -1.426,1.417 -1.426,1.415 -1.427,1.412 -1.427,1.41 -1.428,1.407 -1.429,1.405 -1.43,1.402 -1.432,1.4 -1.433,1.398 -1.435,1.396 -1.436,1.394 -1.438,1.392 -1.44,1.39 -1.442,1.388 -1.444,1.386 -1.446,1.385 -1.448,1.383 -1.45,1.382 -1.452,1.38 -1.455,1.379 -1.457,1.378 -1.46,1.377 -1.462,1.377 -1.465,1.376 -1.467,1.376 -1.47,1.375 -2.155,1.375 -2.158,1.376 -2.16,1.376 -2.163,1.377 -2.165,1.377 -2.168,1.378 -2.17,1.379 -2.173,1.38 -2.175,1.382 -2.177,1.383 -2.179,1.385 -2.181,1.386 -2.183,1.388 -2.185,1.39 -2.187,1.392 -2.189,1.394 -2.19,1.396 -2.192,1.398 -2.193,1.4 -2.195,1.402 -2.196,1.405 -2.197,1.407 -2.198,1.41 -2.198,1.412 -2.199,1.415 -2.199,1.417 -2.2,1.42 -2.2,1.422 -2.2,1.425 -2.2,1.55 -2.2,1.553 -2.2,1.555 -2.199,1.558 -2.199,1.56 -2.198,1.563 -2.198,1.565 -2.197,1.568 -2.196,1.57 -2.195,1.573 -2.193,1.575 -2.192,1.577 -2.19,1.579 -2.189,1.581 -2.187,1.583 -2.185,1.585 -2.183,1.587 -2.181,1.589 -2.179,1.59 -2.177,1.592 -2.175,1.593 -2.173,1.595 -2.17,1.596 -2.168,1.597 -2.165,1.598 -2.163,1.598 -2.16,1.599 -2.158,1.599 -2.155,1.6 -1.825,1.6 -1.825,1.9 -1.825,1.903 -1.825,1.905 -1.824,1.908 -1.824,1.91 -1.823,1.913 -1.823,1.915 -1.822,1.918 -1.821,1.92 -1.82,1.923 -1.818,1.925 -1.817,1.927 -1.815,1.929 -1.814,1.931 -1.812,1.933 -1.81,1.935 -1.808,1.937 -1.806,1.939 -1.804,1.94 -1.802,1.942 -1.8,1.943 -1.798,1.945 -1.795,1.946 -1.793,1.947 -1.79,1.948 -1.788,1.948 -1.785,1.949 -1.783,1.949 -1.78,1.95 -1.47,1.95
  region: -1.542,-1.376 -1.54,-1.376 -1.537,-1.377 -1.535,-1.377 -1.532,-1.378 -1.53,-1.379 -1.527,-1.38 -1.525,-1.382 -1.523,-1.383 -1.521,-1.385 -1.519,-1.386 -1.517,-1.388 -1.515,-1.39 -1.513,-1.392 -1.511,-1.394 -1.51,-1.396 -1.508,-1.398 -1.507,-1.4 -1.505,-1.402 -1.504,-1.405 -1.503,-1.407 -1.502,-1.41 -1.502,-1.412 -1.501,-1.415 -1.501,-1.417 -1.5,-1.42 -1.5,-1.422 -1.5,-1.425 -1.5,-1.9 -1.5,-1.903 -1.5,-1.905 -1.501,-1.908 -1.501,-1.91 -1.502,-1.913 -1.502,-1.915 -1.503,-1.918 -1.504,-1.92 -1.505,-1.923 -1.507,-1.925 -1.508,-1.927 -1.51,-1.929 -1.511,-1.931 -1.513,-1.933 -1.515,-1.935 -1.517,-1.937 -1.519,-1.939 -1.521,-1.94 -1.523,-1.942 -1.525,-1.943 -1.527,-1.945 -1.53,-1.946 -1.532,-1.947 -1.535,-1.948 -1.537,-1.948 -1.54,-1.949 -1.542,-1.949 -1.545,-1.95 -1.805,-1.95 -1.808,-1.949 -1.81,-1.949 -1.813,-1.948 -1.815,-1.948 -1.818,-1.947 -1.82,-1.946 -1.823,-1.945 -1.825,-1.943 -1.827,-1.942 -1.829,-1.94 -1.831,-1.939 -1.833,-1.937 -1.835,-1.935 -1.837,-1.933 -1.839,-1.931 -1.84,-1.929 -1.842,-1.927 -1.843,-1.925 -1.845,-1.923 -1.846,-1.92 -1.847,-1.918 -1.848,-1.915 -1.848,-1.913 -1.849,-1.91 -1.849,-1.908 -1.85,-1.905 -1.85,-1.903 -1.85,-1.9 -1.85,-1.6 -2.155,-1.6 -2.158,-1.599 -2.16,-1.599 -2.163,-1.598 -2.165,-1.598 -2.168,-1.597 -2.17,-1.596 -2.173,-1.595 -2.175,-1.593 -2.177,-1.592 -2.179,-1.59 -2.181,-1.589 -2.183,-1.587 -2.185,-1.585 -2.187,-1.583 -2.189,-1.581 -2.19,-1.579 -2.192,-1.577 -2.193,-1.575 -2.195,-1.573 -2.196,-1.57 -2.197,-1.568 -2.198,-1.565 -2.198,-1.563 -2.199,-1.56 -2.199,-1.558 -2.2,-1.555 -2.2,-1.553 -2.2,-1.55 -2.2,-1.425 -2.2,-1.422 -2.2,-1.42 -2.199,-1.417 -2.199,-1.415 -2.198,-1.412 -2.198,-1.41 -2.197,-1.407 -2.196,-1.405 -2.195,-1.402 -2.193,-1.4 -2.192,-1.398 -2.19,-1.396 -2.189,-1.394 -2.187,-1.392 -2.185,-1.39 -2.183,-1.388 -2.181,-1.386 -2.179,-1.385 -2.177,-1.383 -2.175,-1.382 -2.173,-1.38 -2.17,-1.379 -2.168,-1.378 -2.165,-1.377 -2.163,-1.377 -2.16,-1.376 -2.158,-1.376 -2.155,-1.375 -1.545,-1.375
  region: 2.158,-1.376 2.16,-1.376 2.163,-1.377 2.165,-1.377 2.168,-1.378 2.17,-1.379 2.173,-1.38 2.175,-1.382 2.177,-1.383 2.179,-1.385 2.181,-1.386 2.183,-1.388 2.185,-1.39 2.187,-1.392 2.189,-1.394 2.19,-1.396 2.192,-1.398 2.193,-1.4 2.195,-1.402 2.196,-1.405 2.197,-1.407 2.198,-1.41 2.198,-1.412 2.199,-1.415 2.199,-1.417 2.2,-1.42 2.2,-1.422 2.2,-1.425 2.2,-1.55 2.2,-1.553 2.2,-1.555 2.199,-1.558 2.199,-1.56 2.198,-1.563 2.198,-1.565 2.197,-1.568 2.196,-1.57 2.195,-1.573 2.193,-1.575 2.192,-1.577 2.19,-1.579 2.189,-1.581 2.187,-1.583 2.185,-1.585 2.183,-1.587 2.181,-1.589 2.179,-1.59 2.177,-1.592 2.175,-1.593 2.173,-1.595 2.17,-1.596 2.168,-1.597 2.165,-1.598 2.163,-1.598 2.16,-1.599 2.158,-1.599 2.155,-1.6 1.85,-1.6 1.85,-1.9 1.85,-1.903 1.85,-1.905 1.849,-1.908 1.849,-1.91 1.848,-1.913 1.848,-1.915 1.847,-1.918 1.846,-1.92 1.845,-1.923 1.843,-1.925 1.842,-1.927 1.84,-1.929 1.839,-1.931 1.837,-1.933 1.835,-1.935 1.833,-1.937 1.831,-1.939 1.829,-1.94 1.827,-1.942 1.825,-1.943 1.823,-1.945 1.82,-1.946 1.818,-1.947 1.815,-1.948 1.813,-1.948 1.81,-1.949 1.808,-1.949 1.805,-1.95 1.545,-1.95 1.542,-1.949 1.54,-1.949 1.537,-1.948 1.535,-1.948 1.532,-1.947 1.53,-1.946 1.527,-1.945 1.525,-1.943 1.523,-1.942 1.521,-1.94 1.519,-1.939 1.517,-1.937 1.515,-1.935 1.513,-1.933 1.511,-1.931 1.51,-1.929 1.508,-1.927 1.507,-1.925 1.505,-1.923 1.504,-1.92 1.503,-1.918 1.502,-1.915 1.502,-1.913 1.501,-1.91 1.501,-1.908 1.5,-1.905 1.5,-1.903 1.5,-1.9 1.5,-1.425 1.5,-1.422 1.5,-1.42 1.501,-1.417 1.501,-1.415 1.502,-1.412 1.502,-1.41 1.503,-1.407 1.504,-1.405 1.505,-1.402 1.507,-1.4 1.508,-1.398 1.51,-1.396 1.511,-1.394 1.513,-1.392 1.515,-1.39 1.517,-1.388 1.519,-1.386 1.521,-1.385 1.523,-1.383 1.525,-1.382 1.527,-1.38 1.53,-1.379 1.532,-1.378 1.535,-1.377 1.537,-1.377 1.54,-1.376 1.542,-1.376 1.545,-1.375 2.155,-1.375
  region: 1.783,1.949 1.785,1.949 1.788,1.948 1.79,1.948 1.793,1.947 1.795,1.946 1.798,1.945 1.8,1.943 1.802,1.942 1.804,1.94 1.806,1.939 1.808,1.937 1.81,1.935 1.812,1.933 1.814,1.931 1.815,1.929 1.817,1.927 1.818,1.925 1.82,1.923 1.821,1.92 1.822,1.918 1.823,1.915 1.823,1.913 1.824,1.91 1.824,1.908 1.825,1.905 1.825,1.903 1.825,1.9 1.825,1.6 2.155,1.6 2.158,1.599 2.16,1.599 2.163,1.598 2.165,1.598 2.168,1.597 2.17,1.596 2.173,1.595 2.175,1.593 2.177,1.592 2.179,1.59 2.181,1.589 2.183,1.587 2.185,1.585 2.187,1.583 2.189,1.581 2.19,1.579 2.192,1.577 2.193,1.575 2.195,1.573 2.196,1.57 2.197,1.568 2.198,1.565 2.198,1.563 2.199,1.56 2.199,1.558 2.2,1.555 2.2,1.553 2.2,1.55 2.2,1.425 2.2,1.422 2.2,1.42 2.199,1.417 2.199,1.415 2.198,1.412 2.198,1.41 2.197,1.407 2.196,1.405 2.195,1.402 2.193,1.4 2.192,1.398 2.19,1.396 2.189,1.394 2.187,1.392 2.185,1.39 2.183,1.388 2.181,1.386 2.179,1.385 2.177,1.383 2.175,1.382 2.173,1.38 2.17,1.379 2.168,1.378 2.165,1.377 2.163,1.377 2.16,1.376 2.158,1.376 2.155,1.375 1.47,1.375 1.467,1.376 1.465,1.376 1.462,1.377 1.46,1.377 1.457,1.378 1.455,1.379 1.452,1.38 1.45,1.382 1.448,1.383 1.446,1.385 1.444,1.386 1.442,1.388 1.44,1.39 1.438,1.392 1.436,1.394 1.435,1.396 1.433,1.398 1.432,1.4 1.43,1.402 1.429,1.405 1.428,1.407 1.427,1.41 1.427,1.412 1.426,1.415 1.426,1.417 1.425,1.42 1.425,1.422 1.425,1.425 1.425,1.9 1.425,1.903 1.425,1.905 1.426,1.908 1.426,1.91 1.427,1.913 1.427,1.915 1.428,1.918 1.429,1.92 1.43,1.923 1.432,1.925 1.433,1.927 1.435,1.929 1.436,1.931 1.438,1.933 1.44,1.935 1.442,1.937 1.444,1.939 1.446,1.94 1.448,1.942 1.45,1.943 1.452,1.945 1.455,1.946 1.457,1.947 1.46,1.948 1.462,1.948 1.465,1.949 1.467,1.949 1.47,1.95 1.78,1.95
Top Overlay:
  circle w0.25: c-2.9,1.5 r0.125
  lines w0.2: -2.3,-1.85 -2.3,-2.05 -2,-2.05 ; -2.3,1.85 -2.3,2.05 -2,2.05 ; 2,-2.05 2.3,-2.05 2.3,-1.85 ; 2,2.05 2.3,2.05 2.3,1.85
Top Solder:
  drawing of 4 lines, arcs and shapes, not listed
Top Courtyard:
  lines w0.025: -2.5,-2.3 -2.5,1.4 -2.5,2.3 -1.15,2.3 1.15,2.3 2.5,2.3 2.5,1.4 2.5,-1.4 2.5,-2.3 1.15,-2.3 -1.15,-2.3 -2.3,-2.3 -2.5,-2.3
Top Assembly:
  lines w0.05: -2,-1.75 -2,1.75 2,1.75 2,-1.75 -2,-1.75 ; -1.6,1.175 cw(c-1.6,1.35) -1.6,1.525 cw(c-1.6,1.35) -1.6,1.175
  text ".Designator" at -4.511,-0.453 h2
3D body "VQFNHR26_RPM0026A.x_t": height 1, standoff 0, extent -2,-1.75 2,1.75

## VQFNP48_RTC0048G [mm] "QFN, 48-Leads, Body 7x7mm, Pitch 0.50mm, Thermal Pad 5.70x5.70mm. TI case RTC0048G"
height 0.85
pads (49):
  rect 0.6x0.24 smd paste+0 mask+0.05: 1(-3.4,2.75)
  oval 0.6x0.24 smd paste+0 mask+0.05: 2(-3.4,2.25) 3(-3.4,1.75) 4(-3.4,1.25) 5(-3.4,0.75) 6(-3.4,0.25) 7(-3.4,-0.25) 8(-3.4,-0.75) 9(-3.4,-1.25) 10(-3.4,-1.75) 11(-3.4,-2.25) 12(-3.4,-2.75) 25(3.4,-2.75) 26(3.4,-2.25) 27(3.4,-1.75) 28(3.4,-1.25) 29(3.4,-0.75) 30(3.4,-0.25) 31(3.4,0.25) 32(3.4,0.75) 33(3.4,1.25) 34(3.4,1.75) 35(3.4,2.25) 36(3.4,2.75)
  oval 0.24x0.6 smd paste+0 mask+0.05: 13(-2.75,-3.4) 14(-2.25,-3.4) 15(-1.75,-3.4) 16(-1.25,-3.4) 17(-0.75,-3.4) 18(-0.25,-3.4) 19(0.25,-3.4) 20(0.75,-3.4) 21(1.25,-3.4) 22(1.75,-3.4) 23(2.25,-3.4) 24(2.75,-3.4) 37(2.75,3.4) 38(2.25,3.4) 39(1.75,3.4) 40(1.25,3.4) 41(0.75,3.4) 42(0.25,3.4) 43(-0.25,3.4) 44(-0.75,3.4) 45(-1.25,3.4) 46(-1.75,3.4) 47(-2.25,3.4) 48(-2.75,3.4)
  rrect3% 5.7x5.7 smd paste-50 mask+0.05: EP(0,0)
Top Overlay:
  circle w0.25: c-4.25,3.5 r0.125
  lines w0.2: -3.65,-3.65 -3.275,-3.65 -3.65,-3.275 -3.65,-3.65 ; -3.65,3.275 -3.65,3.65 -3.275,3.65 -3.65,3.275 ; 3.275,-3.65 3.65,-3.65 3.65,-3.275 3.275,-3.65 ; 3.275,3.65 3.65,3.65 3.65,3.275 3.275,3.65
Top Paste:
  region: 1.15,-2.45 1.15,-1.45 0.15,-1.45 0.15,-2.45
  region: -1.45,-2.45 -1.45,-1.45 -2.45,-1.45 -2.45,-2.45
  region: -0.15,-2.45 -0.15,-1.45 -1.15,-1.45 -1.15,-2.45
  region: -1.45,0.15 -1.45,1.15 -2.45,1.15 -2.45,0.15
  region: -0.15,0.15 -0.15,1.15 -1.15,1.15 -1.15,0.15
  region: 1.15,0.15 1.15,1.15 0.15,1.15 0.15,0.15
  region: 1.15,-1.15 1.15,-0.15 0.15,-0.15 0.15,-1.15
  region: -1.45,-1.15 -1.45,-0.15 -2.45,-0.15 -2.45,-1.15
  region: -0.15,-1.15 -0.15,-0.15 -1.15,-0.15 -1.15,-1.15
  region: -1.45,1.45 -1.45,2.45 -2.45,2.45 -2.45,1.45
  region: -0.15,1.45 -0.15,2.45 -1.15,2.45 -1.15,1.45
  region: 1.15,1.45 1.15,2.45 0.15,2.45 0.15,1.45
  region: 2.45,-2.45 2.45,-1.45 1.45,-1.45 1.45,-2.45
  region: 2.45,0.15 2.45,1.15 1.45,1.15 1.45,0.15
  region: 2.45,-1.15 2.45,-0.15 1.45,-0.15 1.45,-1.15
  region: 2.45,1.45 2.45,2.45 1.45,2.45 1.45,1.45
Top Courtyard:
  lines w0.025: -4,-3.15 -4,3.15 -3.684,3.15 -3.684,3.7 -3.15,3.7 -3.15,4 3.15,4 3.15,3.684 3.7,3.684 3.7,3.15 4,3.15 4,-3.15 3.684,-3.15 3.684,-3.7 3.15,-3.7 3.15,-4 -3.15,-4 -3.15,-3.684 -3.7,-3.684 -3.7,-3.15 -4,-3.15
Top Assembly:
  drawing of 273 lines, arcs and shapes, not listed
  text ".Designator" at -4.511,-0.453 h2
3D body "VQFNP48_RTC0048G.x_t": height 0.87, standoff 0, extent -3.505,-3.505 3.505,3.505

## VSON8_DRB0008A [mm] "VSON8, 3mm x 3mm TI Reference DRB0008A"
height 1
pads (9):
  rect 0.6x0.31 smd paste+0 mask+0.05: 1(-1.4,0.975)
  rrect50% 0.6x0.31 smd paste+0 mask+0.05: 2(-1.4,0.325) 3(-1.4,-0.325) 4(-1.4,-0.975) 5(1.4,-0.975) 6(1.4,-0.325) 7(1.4,0.325) 8(1.4,0.975)
  round 0.025 smd paste-2 mask+0.05: EP(0,0)
Top Layer:
  region: -0.44,-1.65 -0.44,-0.925 -0.441,-0.915 -0.448,-0.897 -0.462,-0.883 -0.48,-0.876 -0.49,-0.875 -0.675,-0.875 -0.69,-0.875 -0.717,-0.864 -0.739,-0.843 -0.75,-0.815 -0.75,-0.8 -0.75,0.8 -0.75,0.815 -0.739,0.842 -0.717,0.864 -0.69,0.875 -0.675,0.875 -0.49,0.875 -0.48,0.876 -0.462,0.883 -0.448,0.897 -0.441,0.915 -0.44,0.925 -0.44,1.65 -0.44,1.66 -0.432,1.678 -0.418,1.692 -0.4,1.7 -0.39,1.7 -0.26,1.7 -0.25,1.7 -0.232,1.692 -0.218,1.678 -0.21,1.66 -0.21,1.65 -0.21,0.925 -0.209,0.915 -0.202,0.897 -0.188,0.883 -0.17,0.876 -0.16,0.875 0.16,0.875 0.17,0.876 0.188,0.883 0.202,0.897 0.209,0.915 0.21,0.925 0.21,1.65 0.21,1.66 0.218,1.678 0.232,1.692 0.25,1.7 0.26,1.7 0.39,1.7 0.4,1.7 0.418,1.692 0.432,1.678 0.44,1.66 0.44,1.65 0.44,0.925 0.441,0.915 0.448,0.897 0.462,0.883 0.48,0.876 0.49,0.875 0.675,0.875 0.69,0.875 0.717,0.864 0.739,0.842 0.75,0.815 0.75,0.8 0.75,-0.8 0.75,-0.815 0.739,-0.843 0.717,-0.864 0.69,-0.875 0.675,-0.875 0.49,-0.875 0.48,-0.876 0.462,-0.883 0.448,-0.897 0.441,-0.915 0.44,-0.925 0.44,-1.65 0.44,-1.66 0.432,-1.678 0.418,-1.692 0.4,-1.7 0.39,-1.7 0.26,-1.7 0.25,-1.7 0.232,-1.692 0.218,-1.678 0.21,-1.66 0.21,-1.65 0.21,-0.925 0.209,-0.915 0.202,-0.897 0.188,-0.883 0.17,-0.876 0.16,-0.875 -0.16,-0.875 -0.17,-0.876 -0.188,-0.883 -0.202,-0.897 -0.209,-0.915 -0.21,-0.925 -0.21,-1.65 -0.21,-1.66 -0.218,-1.678 -0.232,-1.692 -0.25,-1.7 -0.26,-1.7 -0.39,-1.7 -0.4,-1.7 -0.418,-1.692 -0.432,-1.678 -0.44,-1.66
Top Overlay:
  circle w0.25: c-2.2,1.5 r0.125
  lines w0.2: -1.7,-1.4 -1.7,-1.7 -0.8,-1.7 ; -1.7,1.4 -1.7,1.7 -0.8,1.7 ; 0.8,-1.7 1.7,-1.7 1.7,-1.4 ; 0.8,1.7 1.7,1.7 1.7,1.4
Top Paste:
  rectangle: 0.15,0.15 0.75,0.75
  rectangle: -0.75,0.15 -0.15,0.75
  rectangle: 0.15,-0.75 0.75,-0.15
  rectangle: -0.75,-0.75 -0.15,-0.15
  region: -0.21,1.65 -0.21,1.05 -0.44,1.05 -0.44,1.65 -0.44,1.66 -0.432,1.678 -0.418,1.692 -0.4,1.7 -0.39,1.7 -0.26,1.7 -0.25,1.7 -0.232,1.692 -0.218,1.678 -0.21,1.66
  region: 0.21,1.65 0.21,1.05 0.44,1.05 0.44,1.65 0.44,1.66 0.432,1.678 0.418,1.692 0.4,1.7 0.39,1.7 0.26,1.7 0.25,1.7 0.232,1.692 0.218,1.678 0.21,1.66
  region: -0.21,-1.65 -0.21,-1.05 -0.44,-1.05 -0.44,-1.65 -0.44,-1.66 -0.432,-1.678 -0.418,-1.692 -0.4,-1.7 -0.39,-1.7 -0.26,-1.7 -0.25,-1.7 -0.232,-1.692 -0.218,-1.678 -0.21,-1.66
  region: 0.21,-1.65 0.21,-1.05 0.44,-1.05 0.44,-1.65 0.44,-1.66 0.432,-1.678 0.418,-1.692 0.4,-1.7 0.39,-1.7 0.26,-1.7 0.25,-1.7 0.232,-1.692 0.218,-1.678 0.21,-1.66
Top Courtyard:
  lines w0.025: -1.95,-1.95 -1.95,1.95 1.95,1.95 1.95,-1.95 -1.95,-1.95
Top Assembly:
  circle w0.05: c-1,1 r0.25
  lines w0.05: -1.5,-1.125 -1.52,-1.125 -1.52,-0.825 -1.5,-0.825 ; -1.5,-0.475 -1.52,-0.475 -1.52,-0.175 -1.5,-0.175 ; -1.5,0.175 -1.52,0.175 -1.52,0.475 -1.5,0.475 ; -1.5,0.825 -1.52,0.825 -1.52,1.125 -1.5,1.125 ; -0.44,-1.5 -0.44,-1.52 -0.21,-1.52 -0.21,-1.5 ; -0.44,1.5 -0.44,1.52 -0.21,1.52 -0.21,1.5 ; 0.21,-1.5 0.21,-1.52 0.44,-1.52 0.44,-1.5 ; 0.21,1.5 0.21,1.52 0.44,1.52 0.44,1.5 ; 1.5,-1.125 1.52,-1.125 1.52,-0.825 1.5,-0.825 ; 1.5,-0.475 1.52,-0.475 1.52,-0.175 1.5,-0.175 ; 1.5,0.175 1.52,0.175 1.52,0.475 1.5,0.475 ; 1.5,0.825 1.52,0.825 1.52,1.125 1.5,1.125 ; -1.5,-1.5 -1.5,1.5 1.5,1.5 1.5,-1.5 -1.5,-1.5
  text ".Designator" at -2.252,-0.226 h1
3D body "DRB0008A.x_t": height 1.02, standoff 0, extent -1.52,-1.52 1.52,1.52

## VSON10_DRC0010J [mm] "VSON10, 3mm x 3mm TI Reference DRC0010J"
height 1
pads (15):
  rect 0.6x0.25 smd paste+0 mask+0.05: 1(-1.4,1)
  rrect50% 0.6x0.25 smd paste+0 mask+0.05: 2(-1.4,0.5) 3(-1.4,0) 4(-1.4,-0.5) 5(-1.4,-1) 6(1.4,-1) 7(1.4,-0.5) 8(1.4,0) 9(1.4,0.5) 10(1.4,1)
  rrect50% 0.25x0.6 smd paste-2 mask+0.05: EP(-0.25,-1.4) EP(-0.25,1.4) EP(0.25,-1.4) EP(0.25,1.4)
  rrect10% 1.65x2.4 smd paste-2 mask+0.05: EP(0,0)
Top Overlay:
  circle w0.25: c-2.2,1.5 r0.125
  lines w0.2: -1.7,-1.4 -1.7,-1.7 -0.7,-1.7 ; -1.7,1.4 -1.7,1.7 -0.7,1.7 ; 0.7,-1.7 1.7,-1.7 1.7,-1.4 ; 0.7,1.7 1.7,1.7 1.7,1.4
Top Paste:
  rectangle: 0.1,0.5 0.7,1.1
  rectangle: -0.7,0.5 -0.1,1.1
  rectangle: 0.1,-0.3 0.7,0.3
  rectangle: -0.7,-0.3 -0.1,0.3
  rectangle: 0.1,-1.1 0.7,-0.5
  rectangle: -0.7,-1.1 -0.1,-0.5
  region: 0.125,1.625 0.125,1.35 0.375,1.35 0.375,1.625 0.375,1.64 0.364,1.667 0.342,1.689 0.315,1.7 0.3,1.7 0.2,1.7 0.185,1.7 0.158,1.689 0.136,1.667 0.125,1.64
  region: -0.125,1.625 -0.125,1.35 -0.375,1.35 -0.375,1.625 -0.375,1.64 -0.364,1.667 -0.342,1.689 -0.315,1.7 -0.3,1.7 -0.2,1.7 -0.185,1.7 -0.158,1.689 -0.136,1.667 -0.125,1.64
  region: 0.125,-1.625 0.125,-1.35 0.375,-1.35 0.375,-1.625 0.375,-1.64 0.364,-1.667 0.342,-1.689 0.315,-1.7 0.3,-1.7 0.2,-1.7 0.185,-1.7 0.158,-1.689 0.136,-1.667 0.125,-1.64
  region: -0.125,-1.625 -0.125,-1.35 -0.375,-1.35 -0.375,-1.625 -0.375,-1.64 -0.364,-1.667 -0.342,-1.689 -0.315,-1.7 -0.3,-1.7 -0.2,-1.7 -0.185,-1.7 -0.158,-1.689 -0.136,-1.667 -0.125,-1.64
Top Courtyard:
  lines w0.025: -1.95,-1.95 -1.95,1.95 1.95,1.95 1.95,-1.95 -1.95,-1.95
Top Assembly:
  circle w0.05: c-1.2,1.2 r0.2
  lines w0.05: -1.601,-1.1 -1.671,-1.1 -1.671,-0.9 -1.601,-0.9 ; -1.601,-0.6 -1.671,-0.6 -1.671,-0.4 -1.601,-0.4 ; -1.601,-0.1 -1.671,-0.1 -1.671,0.1 -1.601,0.1 ; -1.601,0.4 -1.671,0.4 -1.671,0.6 -1.601,0.6 ; -1.601,0.9 -1.671,0.9 -1.671,1.1 -1.601,1.1 ; -0.35,-1.601 -0.35,-1.671 -0.15,-1.671 -0.15,-1.601 ; -0.35,1.601 -0.35,1.671 -0.15,1.671 -0.15,1.601 ; 0.15,-1.601 0.15,-1.671 0.35,-1.671 0.35,-1.601 ; 0.15,1.601 0.15,1.671 0.35,1.671 0.35,1.601 ; 1.601,-1.1 1.671,-1.1 1.671,-0.9 1.601,-0.9 ; 1.601,-0.6 1.671,-0.6 1.671,-0.4 1.601,-0.4 ; 1.601,-0.1 1.671,-0.1 1.671,0.1 1.601,0.1 ; 1.601,0.4 1.671,0.4 1.671,0.6 1.601,0.6 ; 1.601,0.9 1.671,0.9 1.671,1.1 1.601,1.1 ; -1.6,-1.6 1.6,-1.6 1.6,1.6 -1.6,1.6 -1.6,-1.6
  text ".Designator" at -2.252,-0.226 h1
3D body "VSON10_DRC0010J.x_t": height 1.05, standoff 0, extent -1.525,-1.525 1.525,1.525

## VSON10_WITH_SOIC8 [mm] "DRC0010J TPS2561DRC with SOIC, 8-Leads, Body 3.90x4.90mm, Pitch 1.27mm AIC1526"
height 1.75
pads (23):
  rect 0.25x0.6 smd paste+0 mask+0.05: 1(1,1.4)
  oval 1.45x0.6 smd paste+0 mask+0.05: 1(2.725,-0.635) 2(2.725,0.635) 5(-2.725,-1.905) 6(-2.725,-0.635) 8(2.725,-1.905) 9(2.725,1.905) 10(-2.725,0.635)
  rrect50% 0.25x0.6 smd paste+0 mask+0.05: 2(0.5,1.4) 3(0,1.4) 4(-0.5,1.4) 5(-1,1.4) 6(-1,-1.4) 7(-0.5,-1.4) 8(0,-1.4) 9(0.5,-1.4) 10(1,-1.4)
  rect 1.45x0.6 smd paste+0 mask+0.05: 4(-2.725,1.905)
  rrect50% 0.6x0.25 smd paste-2 mask+0.05: EP(-1.4,-0.25) EP(-1.4,0.25) EP(1.4,-0.25) EP(1.4,0.25)
  rrect10% 2.4x1.65 smd paste-2 mask+0.05: EP(0,0)
Top Overlay:
  circle w0.25: c-2.725,2.755 r0.125
  circle w0.2: c1.5,2.1 r0.1
  lines w0.2: -3.556,-1.27 -1.706,-1.27 ; -3.556,0 -1.956,0 ; -3.556,1.27 -1.706,1.27 ; -1.7,-0.7 -1.7,-1.7 -1.4,-1.7 ; -1.7,0.7 -1.7,1.7 -1.4,1.7 ; -1.6,-2.5 1.6,-2.5 ; -1.6,2.5 1.6,2.5 ; 1.4,-1.7 1.7,-1.7 1.7,-0.7 ; 1.4,1.7 1.7,1.7 1.7,0.7 ; 1.706,-1.27 3.556,-1.27 ; 1.706,1.27 3.556,1.27 ; 1.956,0 3.556,0
Top Paste:
  region: 0.5,-0.1 0.5,-0.7 1.1,-0.7 1.1,-0.1
  region: 0.5,0.7 0.5,0.1 1.1,0.1 1.1,0.7
  region: -0.3,-0.1 -0.3,-0.7 0.3,-0.7 0.3,-0.1
  region: -0.3,0.7 -0.3,0.1 0.3,0.1 0.3,0.7
  region: -1.1,-0.1 -1.1,-0.7 -0.5,-0.7 -0.5,-0.1
  region: -1.1,0.7 -1.1,0.1 -0.5,0.1 -0.5,0.7
  region: 1.625,-0.125 1.35,-0.125 1.35,-0.375 1.625,-0.375 1.64,-0.375 1.667,-0.364 1.689,-0.342 1.7,-0.315 1.7,-0.3 1.7,-0.2 1.7,-0.185 1.689,-0.158 1.667,-0.136 1.64,-0.125
  region: 1.625,0.125 1.35,0.125 1.35,0.375 1.625,0.375 1.64,0.375 1.667,0.364 1.689,0.342 1.7,0.315 1.7,0.3 1.7,0.2 1.7,0.185 1.689,0.158 1.667,0.136 1.64,0.125
  region: -1.625,-0.125 -1.35,-0.125 -1.35,-0.375 -1.625,-0.375 -1.64,-0.375 -1.667,-0.364 -1.689,-0.342 -1.7,-0.315 -1.7,-0.3 -1.7,-0.2 -1.7,-0.185 -1.689,-0.158 -1.667,-0.136 -1.64,-0.125
  region: -1.625,0.125 -1.35,0.125 -1.35,0.375 -1.625,0.375 -1.64,0.375 -1.667,0.364 -1.689,0.342 -1.7,0.315 -1.7,0.3 -1.7,0.2 -1.7,0.185 -1.689,0.158 -1.667,0.136 -1.64,0.125
Top Courtyard:
  lines w0.025: -3.95,-3.1 3.95,-3.1 3.95,3.1 -3.95,3.1 -3.95,-3.1
Top Assembly:
  circle w0.05: c1.2,1.2 r0.2
  lines w0.05: -1.601,-0.35 -1.671,-0.35 -1.671,-0.15 -1.601,-0.15 ; -1.601,0.15 -1.671,0.15 -1.671,0.35 -1.601,0.35 ; -1.1,-1.601 -1.1,-1.671 -0.9,-1.671 -0.9,-1.601 ; -1.1,1.601 -1.1,1.671 -0.9,1.671 -0.9,1.601 ; -0.6,-1.601 -0.6,-1.671 -0.4,-1.671 -0.4,-1.601 ; -0.6,1.601 -0.6,1.671 -0.4,1.671 -0.4,1.601 ; -0.1,-1.601 -0.1,-1.671 0.1,-1.671 0.1,-1.601 ; -0.1,1.601 -0.1,1.671 0.1,1.671 0.1,1.601 ; 0.4,-1.601 0.4,-1.671 0.6,-1.671 0.6,-1.601 ; 0.4,1.601 0.4,1.671 0.6,1.671 0.6,1.601 ; 0.9,-1.601 0.9,-1.671 1.1,-1.671 1.1,-1.601 ; 0.9,1.601 0.9,1.671 1.1,1.671 1.1,1.601 ; 1.601,-0.35 1.671,-0.35 1.671,-0.15 1.601,-0.15 ; 1.601,0.15 1.671,0.15 1.671,0.35 1.601,0.35 ; -1.6,-1.6 -1.6,1.6 1.6,1.6 1.6,-1.6 -1.6,-1.6
  text ".Designator" at -2.252,-0.226 h1
3D body "VSON10_DRC0010J.x_t": height 1.05, standoff 0, extent -1.525,-1.525 1.525,1.525

## VSON10_WITH_SOIC8_NO_PASTE [mm] "DRC0010J TPS2561DRC with SOIC, 8-Leads, Body 3.90x4.90mm, Pitch 1.27mm AIC1526"
height 1.75
pads (23):
  rect 0.25x0.6 smd paste-0.5 mask+0.05: 1(1,1.4)
  oval 1.45x0.6 smd paste+0 mask+0.05: 1(2.725,-0.635) 2(2.725,0.635) 5(-2.725,-1.905) 6(-2.725,-0.635) 8(2.725,-1.905) 9(2.725,1.905) 10(-2.725,0.635)
  rrect50% 0.25x0.6 smd paste-0.5 mask+0.05: 2(0.5,1.4) 3(0,1.4) 4(-0.5,1.4) 5(-1,1.4) 6(-1,-1.4) 7(-0.5,-1.4) 8(0,-1.4) 9(0.5,-1.4) 10(1,-1.4)
  rect 1.45x0.6 smd paste+0 mask+0.05: 4(-2.725,1.905)
  rrect50% 0.6x0.25 smd paste-2 mask+0.05: EP(-1.4,-0.25) EP(-1.4,0.25) EP(1.4,-0.25) EP(1.4,0.25)
  rrect10% 2.4x1.65 smd paste-2 mask+0.05: EP(0,0)
Top Overlay:
  circle w0.25: c-2.725,2.755 r0.125
  circle w0.2: c1.5,2.1 r0.1
  lines w0.2: -3.556,-1.27 -1.706,-1.27 ; -3.556,0 -1.956,0 ; -3.556,1.27 -1.706,1.27 ; -1.7,-0.7 -1.7,-1.7 -1.4,-1.7 ; -1.7,0.7 -1.7,1.7 -1.4,1.7 ; -1.6,-2.5 1.6,-2.5 ; -1.6,2.5 1.6,2.5 ; 1.4,-1.7 1.7,-1.7 1.7,-0.7 ; 1.4,1.7 1.7,1.7 1.7,0.7 ; 1.706,-1.27 3.556,-1.27 ; 1.706,1.27 3.556,1.27 ; 1.956,0 3.556,0
Top Courtyard:
  lines w0.025: -3.95,-3.1 3.95,-3.1 3.95,3.1 -3.95,3.1 -3.95,-3.1
Top Assembly:
  circle w0.05: c1.2,1.2 r0.2
  lines w0.05: -1.601,-0.35 -1.671,-0.35 -1.671,-0.15 -1.601,-0.15 ; -1.601,0.15 -1.671,0.15 -1.671,0.35 -1.601,0.35 ; -1.1,-1.601 -1.1,-1.671 -0.9,-1.671 -0.9,-1.601 ; -1.1,1.601 -1.1,1.671 -0.9,1.671 -0.9,1.601 ; -0.6,-1.601 -0.6,-1.671 -0.4,-1.671 -0.4,-1.601 ; -0.6,1.601 -0.6,1.671 -0.4,1.671 -0.4,1.601 ; -0.1,-1.601 -0.1,-1.671 0.1,-1.671 0.1,-1.601 ; -0.1,1.601 -0.1,1.671 0.1,1.671 0.1,1.601 ; 0.4,-1.601 0.4,-1.671 0.6,-1.671 0.6,-1.601 ; 0.4,1.601 0.4,1.671 0.6,1.671 0.6,1.601 ; 0.9,-1.601 0.9,-1.671 1.1,-1.671 1.1,-1.601 ; 0.9,1.601 0.9,1.671 1.1,1.671 1.1,1.601 ; 1.601,-0.35 1.671,-0.35 1.671,-0.15 1.601,-0.15 ; 1.601,0.15 1.671,0.15 1.671,0.35 1.601,0.35 ; -1.6,-1.6 -1.6,1.6 1.6,1.6 1.6,-1.6 -1.6,-1.6
  text ".Designator" at -2.252,-0.226 h1
3D body "VSON10_DRC0010J.x_t": height 1.05, standoff 0, extent -1.525,-1.525 1.525,1.525